# Altium footprint library WR-BHD.PcbLib: 220 footprints (part 1 of 14)
Each footprint in its own frame and in the unit in brackets; x right, y up, seen from the top. Pads: shape width x height; smd on the part's side, far side on the other; paste and mask are expansions set on the pad; w line width, h text height; cw(c..) or ccw(c..) is an arc to the next point about the centre after c.
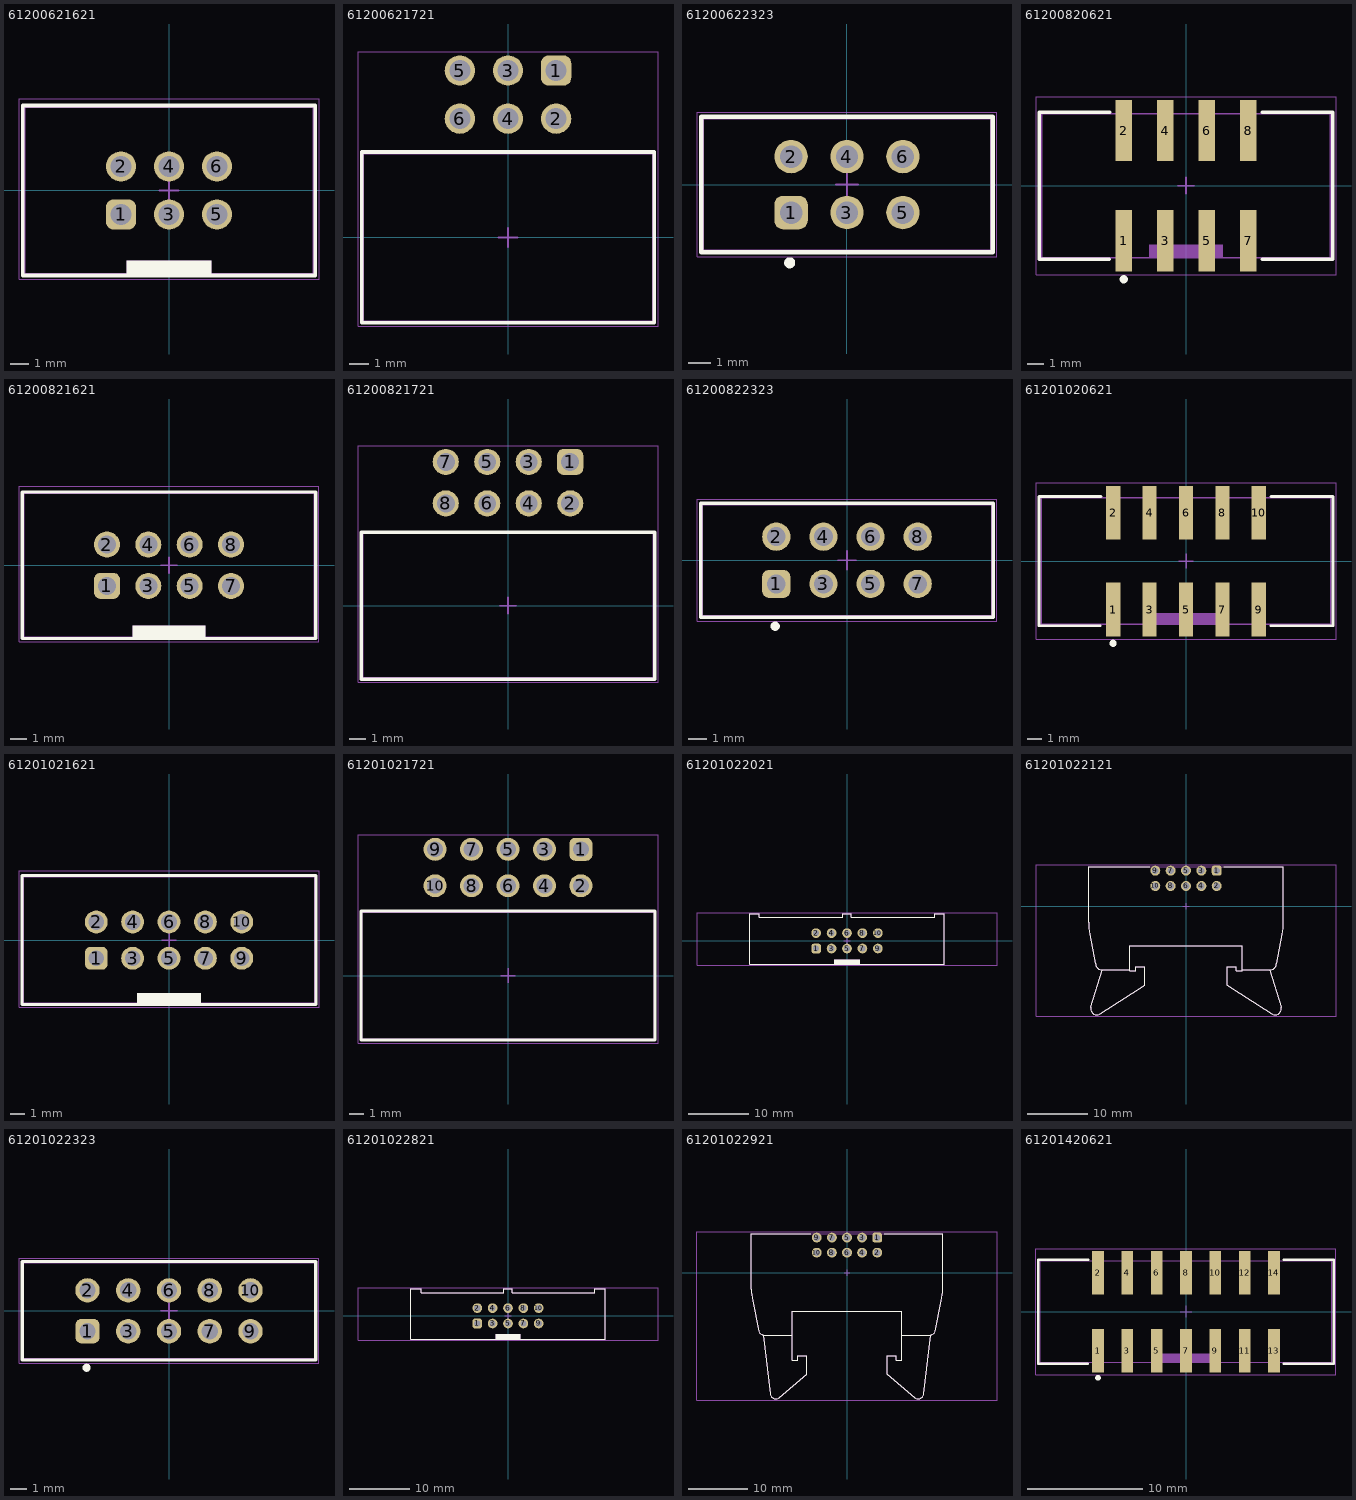
[diagram p0: the footprints below, top view; thin cyan lines are the x and y axes]

## 61200621621 [mm] "6 pins, straight, gold plating"
height 9.1
pads (6):
  rrect50% 1.6x1.6 hole 1.1: 1(-2.54,-1.27)
  round 1.6 hole 1.1: 2(-2.54,1.27) 3(0,-1.27) 4(0,1.27) 5(2.54,-1.27) 6(2.54,1.27)
Top Overlay:
  rectangle: -2.25,-4.5 2.25,-3.7
  lines w0.2: -7.74,-4.5 -7.74,4.5 7.74,4.5 7.74,-4.5 -7.74,-4.5
Top Assembly:
  rectangle: -2.25,-4.425 2.25,-3.7
  lines w0.1: -7.64,-4.425 7.64,-4.425 7.64,4.425 -7.64,4.425 -7.64,-4.425
Top Designator:
  text ".Designator" at -3.647,-0.357 h1
Top 3D Body:
  rectangle: -2.25,-4.425 2.25,-3.7
  lines w0.1: -7.64,-4.425 -7.64,4.425 7.64,4.425 7.64,-4.425 -7.64,-4.425
Top Courtyard:
  lines w0.05: -7.94,-4.7 -7.94,4.85 7.94,4.85 7.94,-4.7 -7.94,-4.7
Top Component Center:
  lines w0.1: -0.5,0 0.5,0 ; 0,-0.5 0,0.5
3D body "61200621621.stp": height 9.13, standoff -2.98, extent -7.64,-4.425 7.64,4.75

## 61200621721 [mm] "6 pins, right angled, gold plating"
height 9.1
pads (6):
  rrect50% 1.6x1.6 hole 1.1: 1(2.54,8.805)
  round 1.6 hole 1.1: 2(2.54,6.265) 3(0,8.805) 4(0,6.265) 5(-2.54,8.805) 6(-2.54,6.265)
Top Overlay:
  lines w0.2: -7.715,-4.5 7.715,-4.5 7.715,4.5 -7.715,4.5 -7.715,-4.5
Top Assembly:
  lines w0.1: -7.64,-4.425 7.64,-4.425 7.64,4.425 -7.64,4.425 -7.64,-4.425
Top Designator:
  text ".Designator" at -3.647,-0.357 h1
Top 3D Body:
  lines w0.1: -7.64,-4.425 -7.64,4.425 7.64,4.425 7.64,-4.425 -7.64,-4.425
Top Courtyard:
  lines w0.05: -7.915,-4.7 -7.915,9.805 7.915,9.805 7.915,-4.7 -7.915,-4.7
Top Component Center:
  lines w0.1: -0.5,0 0.5,0 ; 0,-0.5 0,0.5
3D body "61200621721.stp": height 9.23, standoff -2.88, extent -7.64,-4.425 7.64,9.125

## 61200622323 [mm] "6 pins, selective gold plating"
height 7.3
pads (6):
  rrect50% 1.52x1.52 hole 1.02: 1(-2.54,-1.27)
  round 1.52 hole 1.02: 2(-2.54,1.27) 3(0,-1.27) 4(0,1.27) 5(2.54,-1.27) 6(2.54,1.27)
Top Overlay:
  circle w0.25: c-2.6,-3.55 r0.125
  lines w0.2: -6.61,-3.075 6.61,-3.075 6.61,3.075 -6.61,3.075 -6.61,-3.075
Top Assembly:
  lines w0.1: -6.535,-3 -6.535,3 6.535,3 6.535,-3 -6.535,-3
Top Designator:
  text ".Designator" at -3.647,-0.357 h1
Top 3D Body:
  lines w0.1: -6.535,-3 6.535,-3 6.535,3 -6.535,3 -6.535,-3
Top Courtyard:
  lines w0.05: -6.81,-3.275 6.81,-3.275 6.81,3.275 -6.81,3.275 -6.81,-3.275
Top Component Center:
  lines w0.1: -0.5,0 0.5,0 ; 0,-0.5 0,0.5
3D body "61200622323.stp": height 9.33, standoff -3.27, extent -6.535,-3 6.535,3

## 61200820621 [mm] "8 pins, SMT, straight, gold plating"
height 9.2
pads (8):
  rect 1x3.75 smd: 1(-3.81,-3.375) 2(-3.81,3.375) 3(-1.27,-3.375) 4(-1.27,3.375) 5(1.27,-3.375) 6(1.27,3.375) 7(3.81,-3.375) 8(3.81,3.375)
Top Overlay:
  circle w0.25: c-3.81,-5.725 r0.125
  lines w0.2: -4.7,-4.5 -8.98,-4.5 -8.98,4.5 -4.65,4.5 ; 4.65,-4.5 8.98,-4.5 8.98,4.5 4.65,4.5
Top Assembly:
  rectangle: -2.25,-4.4 2.25,-3.6
  lines w0.1: -8.83,-4.4 -8.83,4.4 8.83,4.4 8.83,-4.4 -8.83,-4.4
Top Designator:
  text ".Designator" at -3.647,-0.357 h1
Top 3D Body:
  rectangle: -2.25,-4.4 2.25,-3.6
  lines w0.1: -8.83,-4.4 8.83,-4.4 8.83,4.4 -8.83,4.4 -8.83,-4.4
Top Courtyard:
  lines w0.05: -9.18,-5.45 9.18,-5.45 9.18,5.45 -9.18,5.45 -9.18,-5.45
Top Component Center:
  lines w0.1: -0.5,0 0.5,0 ; 0,-0.5 0,0.5
3D body "61200820621.stp": height 10.2, standoff 0.01, extent -8.89,-4.75 8.89,4.75

## 61200821621 [mm] "8 pins, straight, gold plating"
height 9.1
pads (8):
  rrect50% 1.6x1.6 hole 1.1: 1(-3.81,-1.27)
  round 1.6 hole 1.1: 2(-3.81,1.27) 3(-1.27,-1.27) 4(-1.27,1.27) 5(1.27,-1.27) 6(1.27,1.27) 7(3.81,-1.27) 8(3.81,1.27)
Top Overlay:
  rectangle: -2.25,-4.5 2.25,-3.7
  lines w0.2: -9.01,-4.5 9.01,-4.5 9.01,4.5 -9.01,4.5 -9.01,-4.5
Top Assembly:
  rectangle: -2.25,-4.425 2.25,-3.7
  lines w0.1: -8.91,-4.425 -8.91,4.425 8.91,4.425 8.91,-4.425 -8.91,-4.425
Top Designator:
  text ".Designator" at -3.647,-0.357 h1
Top 3D Body:
  rectangle: -2.25,-4.425 2.25,-3.7
  lines w0.1: -8.91,-4.425 8.91,-4.425 8.91,4.425 -8.91,4.425 -8.91,-4.425
Top Courtyard:
  lines w0.05: -9.21,-4.7 9.21,-4.7 9.21,4.85 -9.21,4.85 -9.21,-4.7
Top Component Center:
  lines w0.1: -0.5,0 0.5,0 ; 0,-0.5 0,0.5
3D body "61200821621.stp": height 9.13, standoff -2.98, extent -8.91,-4.425 8.91,4.75

## 61200821721 [mm] "8 pins, right angled, gold plating"
height 9.1
pads (8):
  rrect50% 1.6x1.6 hole 1.1: 1(3.81,8.805)
  round 1.6 hole 1.1: 2(3.81,6.265) 3(1.27,8.805) 4(1.27,6.265) 5(-1.27,8.805) 6(-1.27,6.265) 7(-3.81,8.805) 8(-3.81,6.265)
Top Overlay:
  lines w0.2: -8.985,-4.5 -8.985,4.5 8.985,4.5 8.985,-4.5 -8.985,-4.5
Top Assembly:
  lines w0.1: -8.91,-4.425 -8.91,4.425 8.91,4.425 8.91,-4.425 -8.91,-4.425
Top Designator:
  text ".Designator" at -3.647,-0.357 h1
Top 3D Body:
  lines w0.1: -8.91,-4.425 8.91,-4.425 8.91,4.425 -8.91,4.425 -8.91,-4.425
Top Courtyard:
  lines w0.05: -9.185,-4.7 9.185,-4.7 9.185,9.805 -9.185,9.805 -9.185,-4.7
Top Component Center:
  lines w0.1: -0.5,0 0.5,0 ; 0,-0.5 0,0.5
3D body "61200821721.stp": height 9.23, standoff -2.88, extent -8.91,-4.425 8.91,9.125

## 61200822323 [mm] "8 pins, selective gold plating"
height 7.3
pads (8):
  rrect50% 1.52x1.52 hole 1.02: 1(-3.81,-1.27)
  round 1.52 hole 1.02: 2(-3.81,1.27) 3(-1.27,-1.27) 4(-1.27,1.27) 5(1.27,-1.27) 6(1.27,1.27) 7(3.81,-1.27) 8(3.81,1.27)
Top Overlay:
  circle w0.25: c-3.87,-3.55 r0.125
  lines w0.2: -7.88,-3.075 -7.88,3.075 7.88,3.075 7.88,-3.075 -7.88,-3.075
Top Assembly:
  lines w0.1: -7.805,-3 7.805,-3 7.805,3 -7.805,3 -7.805,-3
Top Designator:
  text ".Designator" at -3.647,-0.357 h1
Top 3D Body:
  lines w0.1: -7.805,-3 -7.805,3 7.805,3 7.805,-3 -7.805,-3
Top Courtyard:
  lines w0.05: -8.08,-3.275 -8.08,3.275 8.08,3.275 8.08,-3.275 -8.08,-3.275
Top Component Center:
  lines w0.1: -0.5,0 0.5,0 ; 0,-0.5 0,0.5
3D body "61200822323.stp": height 9.33, standoff -3.27, extent -7.805,-3 7.805,3

## 61201020621 [mm] "10 pins, SMT, straight, gold plating"
height 9.2
pads (10):
  rect 1x3.75 smd: 1(-5.08,-3.375) 2(-5.08,3.375) 3(-2.54,-3.375) 4(-2.54,3.375) 5(0,-3.375) 6(0,3.375) 7(2.54,-3.375) 8(2.54,3.375) 9(5.08,-3.375) 10(5.08,3.375)
Top Overlay:
  circle w0.25: c-5.08,-5.725 r0.125
  lines w0.2: -5.97,-4.5 -10.25,-4.5 -10.25,4.5 -5.92,4.5 ; 5.92,-4.5 10.25,-4.5 10.25,4.5 5.92,4.5
Top Assembly:
  rectangle: -2.25,-4.4 2.25,-3.6
  lines w0.1: -10.1,-4.4 10.1,-4.4 10.1,4.4 -10.1,4.4 -10.1,-4.4
Top Designator:
  text ".Designator" at -3.647,-0.357 h1
Top 3D Body:
  rectangle: -2.25,-4.4 2.25,-3.6
  lines w0.1: -10.1,-4.4 -10.1,4.4 10.1,4.4 10.1,-4.4 -10.1,-4.4
Top Courtyard:
  lines w0.05: -10.45,-5.45 -10.45,5.45 10.45,5.45 10.45,-5.45 -10.45,-5.45
Top Component Center:
  lines w0.1: -0.5,0 0.5,0 ; 0,-0.5 0,0.5
3D body "61201020621.stp": height 10.2, standoff 0.01, extent -10.16,-4.75 10.16,4.75

## 61201021621 [mm] "10 pins, straight, gold plating"
height 9.1
pads (10):
  rrect50% 1.6x1.6 hole 1.1: 1(-5.08,-1.27)
  round 1.6 hole 1.1: 2(-5.08,1.27) 3(-2.54,-1.27) 4(-2.54,1.27) 5(0,-1.27) 6(0,1.27) 7(2.54,-1.27) 8(2.54,1.27) 9(5.08,-1.27) 10(5.08,1.27)
Top Overlay:
  rectangle: -2.25,-4.5 2.25,-3.7
  lines w0.2: -10.28,-4.5 -10.28,4.5 10.28,4.5 10.28,-4.5 -10.28,-4.5
Top Assembly:
  rectangle: -2.25,-4.425 2.25,-3.7
  lines w0.1: -10.18,-4.425 10.18,-4.425 10.18,4.425 -10.18,4.425 -10.18,-4.425
Top Designator:
  text ".Designator" at -3.647,-0.357 h1
Top 3D Body:
  rectangle: -2.25,-4.425 2.25,-3.7
  lines w0.1: -10.18,-4.425 -10.18,4.425 10.18,4.425 10.18,-4.425 -10.18,-4.425
Top Courtyard:
  lines w0.05: -10.48,-4.7 -10.48,4.85 10.48,4.85 10.48,-4.7 -10.48,-4.7
Top Component Center:
  lines w0.1: -0.5,0 0.5,0 ; 0,-0.5 0,0.5
3D body "61201021621.stp": height 9.13, standoff -2.98, extent -10.18,-4.425 10.18,4.75

## 61201021721 [mm] "10 pins, right angled, gold plating"
height 9.1
pads (10):
  rrect50% 1.6x1.6 hole 1.1: 1(5.08,8.805)
  round 1.6 hole 1.1: 2(5.08,6.265) 3(2.54,8.805) 4(2.54,6.265) 5(0,8.805) 6(0,6.265) 7(-2.54,8.805) 8(-2.54,6.265) 9(-5.08,8.805) 10(-5.08,6.265)
Top Overlay:
  lines w0.2: -10.255,-4.5 10.255,-4.5 10.255,4.5 -10.255,4.5 -10.255,-4.5
Top Assembly:
  lines w0.1: -10.18,-4.425 10.18,-4.425 10.18,4.425 -10.18,4.425 -10.18,-4.425
Top Designator:
  text ".Designator" at -3.647,-0.357 h1
Top 3D Body:
  lines w0.1: -10.18,-4.425 -10.18,4.425 10.18,4.425 10.18,-4.425 -10.18,-4.425
Top Courtyard:
  lines w0.05: -10.455,-4.7 -10.455,9.805 10.455,9.805 10.455,-4.7 -10.455,-4.7
Top Component Center:
  lines w0.1: -0.5,0 0.5,0 ; 0,-0.5 0,0.5
3D body "61201021721.stp": height 9.23, standoff -2.88, extent -10.18,-4.425 10.18,9.125

## 61201022021 [mm] "10 pins, straight, short lever, gold plating"
height 24.5
pads (10):
  rrect50% 1.6x1.6 hole 1.02: 1(-5.08,-1.27)
  round 1.6 hole 1.02: 2(-5.08,1.27) 3(-2.54,-1.27) 4(-2.54,1.27) 5(0,-1.27) 6(0,1.27) 7(2.54,-1.27) 8(2.54,1.27) 9(5.08,-1.27) 10(5.08,1.27)
Top Overlay:
  rectangle: -2.1,-3.85 2.1,-3.05
  lines w0.2: -0.7,4.45 -0.7,3.85 -14.45,3.85 -14.45,4.45 -16,4.45 -16,-3.85 16,-3.85 16,4.45 14.45,4.45 14.45,3.85 0.7,3.85 0.7,4.45 -0.7,4.45 ; -0.7,4.45 -0.7,4.45
Top Assembly:
  rectangle: -2.1,-3.85 2.1,-3.05
  lines w0.1: -0.7,4.45 0.7,4.45 0.7,3.85 14.45,3.85 14.45,4.45 16,4.45 16,-3.85 -16,-3.85 -16,4.45 -14.45,4.45 -14.45,3.85 -0.7,3.85 -0.7,4.45 ; -0.7,4.45 -0.7,4.45
Top Designator:
  text ".Designator" at -3.647,-0.357 h1
Top 3D Body:
  rectangle: -2.1,-3.85 2.1,-3.05
  lines w0.1: -0.7,4.45 -0.7,3.85 -14.45,3.85 -14.45,4.45 -16,4.45 -16,-3.85 16,-3.85 16,4.45 14.45,4.45 14.45,3.85 0.7,3.85 0.7,4.45 -0.7,4.45 ; -0.7,4.45 -0.7,4.45
Top Courtyard:
  lines w0.05: -24.7,-4.05 -24.7,4.65 24.7,4.65 24.7,-4.05 -24.7,-4.05
Top Component Center:
  lines w0.1: -0.5,0 0.5,0 ; 0,-0.5 0,0.5
3D body "61201022021.stp": height 24.55, standoff -3.35, extent -16.1,-3.85 16.1,4.45

## 61201022121 [mm] "10 pins, right angeled, short lever, gold plating"
height 8.3
pads (10):
  rrect50% 1.65x1.65 hole 1.1: 1(5.08,5.88)
  round 1.65 hole 1.1: 2(5.08,3.34) 3(2.54,5.88) 4(2.54,3.34) 5(0,5.88) 6(0,3.34) 7(-2.54,5.88) 8(-2.54,3.34) 9(-5.08,5.88) 10(-5.08,3.34)
Top Overlay:
  lines w0.2: -14.964,-9.501 -15.906,-4.611 cw(c-6.1,-2.65) -16.1,-2.65 -16.1,6.5 -6,6.5 ; -14.96,-9.5 ccw(c-13.96,-9.5) -13.96,-10.5 ; -14.055,-10.5 -9.3,-10.5 ; -13.874,-10.601 -15.707,-16.691 ccw(c-14.75,-16.98) -14.2,-17.815 -6.8,-13.08 -6.8,-9.98 -8.3,-9.98 -8.3,-10.69 -9.3,-10.69 -9.3,-6.5 9.3,-6.5 9.3,-10.69 8.3,-10.69 8.3,-9.98 6.8,-9.98 6.8,-13.08 14.2,-17.816 ccw(c14.75,-16.98) 15.707,-16.691 13.874,-10.601 ; 6.25,6.5 16.1,6.5 16.1,-2.65 cw(c6.1,-2.65) 15.906,-4.611 14.964,-9.501 ; 9.3,-10.5 14.055,-10.5 ; 13.96,-10.5 ccw(c13.96,-9.5) 14.96,-9.5
Top Assembly:
  lines w0.1: -14.964,-9.501 -15.906,-4.611 cw(c-6.1,-2.65) -16.1,-2.65 -16.1,6.5 16.1,6.5 16.1,-2.65 cw(c6.1,-2.65) 15.906,-4.611 14.964,-9.501 ; -14.96,-9.5 ccw(c-13.96,-9.5) -13.96,-10.5 ; -14.055,-10.5 -9.3,-10.5 ; -13.874,-10.601 -15.707,-16.691 ccw(c-14.75,-16.98) -14.2,-17.815 -6.8,-13.08 -6.8,-9.98 -8.3,-9.98 -8.3,-10.69 -9.3,-10.69 -9.3,-6.5 9.3,-6.5 9.3,-10.69 8.3,-10.69 8.3,-9.98 6.8,-9.98 6.8,-13.08 14.2,-17.816 ccw(c14.75,-16.98) 15.707,-16.691 13.874,-10.601 ; 9.3,-10.5 14.055,-10.5 ; 13.96,-10.5 ccw(c13.96,-9.5) 14.96,-9.5
Top Designator:
  text ".Designator" at -3.647,-0.357 h1
Top 3D Body:
  lines w0.1: -14.964,-9.501 -15.906,-4.611 cw(c-6.1,-2.65) -16.1,-2.65 -16.1,6.5 16.1,6.5 16.1,-2.65 cw(c6.1,-2.65) 15.906,-4.611 14.964,-9.501 ; -14.96,-9.5 ccw(c-13.96,-9.5) -13.96,-10.5 ; -14.055,-10.5 -9.3,-10.5 ; -13.874,-10.601 -15.707,-16.691 ccw(c-14.75,-16.98) -14.2,-17.815 -6.8,-13.08 -6.8,-9.98 -8.3,-9.98 -8.3,-10.69 -9.3,-10.69 -9.3,-6.5 9.3,-6.5 9.3,-10.69 8.3,-10.69 8.3,-9.98 6.8,-9.98 6.8,-13.08 14.2,-17.816 ccw(c14.75,-16.98) 15.707,-16.691 13.874,-10.601 ; 9.3,-10.5 14.055,-10.5 ; 13.96,-10.5 ccw(c13.96,-9.5) 14.96,-9.5
Top Courtyard:
  lines w0.05: -24.8,-18.2 -24.8,6.88 24.8,6.88 24.8,-18.2 -24.8,-18.2
Top Component Center:
  lines w0.1: -0.5,0 0.5,0 ; 0,-0.5 0,0.5
3D body "61201022121.stp": height 8.35, standoff -3.35, extent -16.1,-18 16.1,6.5

## 61201022323 [mm] "10 pins, selective gold plating"
height 7.3
pads (10):
  rrect50% 1.52x1.52 hole 1.02: 1(-5.08,-1.27)
  round 1.52 hole 1.02: 2(-5.08,1.27) 3(-2.54,-1.27) 4(-2.54,1.27) 5(0,-1.27) 6(0,1.27) 7(2.54,-1.27) 8(2.54,1.27) 9(5.08,-1.27) 10(5.08,1.27)
Top Overlay:
  circle w0.25: c-5.14,-3.55 r0.125
  lines w0.2: -9.15,-3.075 9.15,-3.075 9.15,3.075 -9.15,3.075 -9.15,-3.075
Top Assembly:
  lines w0.1: -9.075,-3 -9.075,3 9.075,3 9.075,-3 -9.075,-3
Top Designator:
  text ".Designator" at -3.647,-0.357 h1
Top 3D Body:
  lines w0.1: -9.075,-3 9.075,-3 9.075,3 -9.075,3 -9.075,-3
Top Courtyard:
  lines w0.05: -9.35,-3.275 9.35,-3.275 9.35,3.275 -9.35,3.275 -9.35,-3.275
Top Component Center:
  lines w0.1: -0.5,0 0.5,0 ; 0,-0.5 0,0.5
3D body "61201022323.stp": height 9.33, standoff -3.27, extent -9.075,-3 9.075,3

## 61201022821 [mm] "10 pins, straight, long lever, gold plating"
height 28
pads (10):
  rrect50% 1.6x1.6 hole 1.02: 1(-5.08,-1.27)
  round 1.6 hole 1.02: 2(-5.08,1.27) 3(-2.54,-1.27) 4(-2.54,1.27) 5(0,-1.27) 6(0,1.27) 7(2.54,-1.27) 8(2.54,1.27) 9(5.08,-1.27) 10(5.08,1.27)
Top Overlay:
  rectangle: -2.1,-3.85 2.1,-3.04
  lines w0.2: -16.1,-3.85 16.1,-3.85 16.1,4.45 14.37,4.45 14.37,3.85 0.7,3.85 0.7,4.45 -0.7,4.45 -0.7,3.85 -14.37,3.85 -14.37,4.45 -16.1,4.45 -16.1,-3.85
Top Assembly:
  rectangle: -2.1,-3.85 2.1,-3.04
  lines w0.1: -16.1,-3.85 -16.1,4.45 -14.37,4.45 -14.37,3.85 -0.7,3.85 -0.7,4.45 0.7,4.45 0.7,3.85 14.37,3.85 14.37,4.45 16.1,4.45 16.1,-3.85 -16.1,-3.85
Top Designator:
  text ".Designator" at -3.647,-0.357 h1
Top 3D Body:
  rectangle: -2.1,-3.85 2.1,-3.04
  lines w0.1: -16.1,-3.85 16.1,-3.85 16.1,4.45 14.37,4.45 14.37,3.85 0.7,3.85 0.7,4.45 -0.7,4.45 -0.7,3.85 -14.37,3.85 -14.37,4.45 -16.1,4.45 -16.1,-3.85
Top Courtyard:
  lines w0.05: -24.8,-4.05 -24.8,4.65 24.8,4.65 24.8,-4.05 -24.8,-4.05
Top Component Center:
  lines w0.1: -0.5,0 0.5,0 ; 0,-0.5 0,0.5
3D body "61201022821 (rev1).stp": height 27.84, standoff -3.35, extent -16.1,-3.86 16.1,4.45

## 61201022921 [mm] "10 pins, right angeled, long lever, gold plating"
height 10.8
pads (10):
  rrect50% 1.65x1.65 hole 1.1: 1(5.08,5.88)
  round 1.65 hole 1.1: 2(5.08,3.34) 3(2.54,5.88) 4(2.54,3.34) 5(0,5.88) 6(0,3.34) 7(-2.54,5.88) 8(-2.54,3.34) 9(-5.08,5.88) 10(-5.08,3.34)
Top Overlay:
  lines w0.2: -16.1,-2.81 -16.1,6.5 -6.05,6.5 ; -16.096,-2.81 ccw(c-6.1,-2.51) -15.854,-4.714 -14.809,-9.884 ; -14.804,-9.883 ccw(c-13.88,-9.5) -13.88,-10.5 -9.2,-10.5 ; -14.064,-10.5 -12.918,-20.372 ccw(c-11.93,-20.22) -11.272,-20.973 -6.801,-17.109 ; -6.8,-17.11 -6.8,-14.01 -8.3,-14.01 -8.3,-14.72 -9.2,-14.72 -9.2,-6.5 9.2,-6.5 9.2,-14.72 8.3,-14.72 8.3,-14.01 6.8,-14.01 6.8,-17.11 ; 6.25,6.5 16.1,6.5 16.1,-2.81 ; 6.801,-17.109 11.272,-20.973 ccw(c11.93,-20.22) 12.918,-20.372 14.064,-10.5 ; 9.2,-10.5 13.88,-10.5 ccw(c13.88,-9.5) 14.804,-9.883 ; 14.809,-9.884 15.854,-4.714 ccw(c6.1,-2.51) 16.096,-2.81
Top Assembly:
  lines w0.1: -16.1,-2.81 -16.1,6.5 16.1,6.5 16.1,-2.81 ; -16.096,-2.81 ccw(c-6.1,-2.51) -15.854,-4.714 -14.809,-9.884 ; -14.804,-9.883 ccw(c-13.88,-9.5) -13.88,-10.5 -9.2,-10.5 ; -14.064,-10.5 -12.918,-20.372 ccw(c-11.93,-20.22) -11.272,-20.973 -6.801,-17.109 ; -6.8,-17.11 -6.8,-14.01 -8.3,-14.01 -8.3,-14.72 -9.2,-14.72 -9.2,-6.5 9.2,-6.5 9.2,-14.72 8.3,-14.72 8.3,-14.01 6.8,-14.01 6.8,-17.11 ; 6.801,-17.109 11.272,-20.973 ccw(c11.93,-20.22) 12.918,-20.372 14.064,-10.5 ; 9.2,-10.5 13.88,-10.5 ccw(c13.88,-9.5) 14.804,-9.883 ; 14.809,-9.884 15.854,-4.714 ccw(c6.1,-2.51) 16.096,-2.81
Top Designator:
  text ".Designator" at -3.647,-0.357 h1
Top 3D Body:
  lines w0.1: -16.1,-2.81 -16.1,6.5 16.1,6.5 16.1,-2.81 ; -16.096,-2.81 ccw(c-6.1,-2.51) -15.854,-4.714 -14.809,-9.884 ; -14.804,-9.883 ccw(c-13.88,-9.5) -13.88,-10.5 -9.2,-10.5 ; -14.064,-10.5 -12.918,-20.372 ccw(c-11.93,-20.22) -11.272,-20.973 -6.801,-17.109 ; -6.8,-17.11 -6.8,-14.01 -8.3,-14.01 -8.3,-14.72 -9.2,-14.72 -9.2,-6.5 9.2,-6.5 9.2,-14.72 8.3,-14.72 8.3,-14.01 6.8,-14.01 6.8,-17.11 ; 6.801,-17.109 11.272,-20.973 ccw(c11.93,-20.22) 12.918,-20.372 14.064,-10.5 ; 9.2,-10.5 13.88,-10.5 ccw(c13.88,-9.5) 14.804,-9.883 ; 14.809,-9.884 15.854,-4.714 ccw(c6.1,-2.51) 16.096,-2.81
Top Courtyard:
  lines w0.05: -25.2,-21.41 -25.2,6.88 25.2,6.88 25.2,-21.41 -25.2,-21.41
Top Component Center:
  lines w0.1: -0.5,0 0.5,0 ; 0,-0.5 0,0.5
3D body "61201022921 (rev1).stp": height 8.35, standoff -2.35, extent -16.1,-21.211 16.1,6.51

## 61201420621 [mm] "14 pins, SMT, straight, gold plating"
height 9.2
pads (14):
  rect 1x3.75 smd: 1(-7.62,-3.375) 2(-7.62,3.375) 3(-5.08,-3.375) 4(-5.08,3.375) 5(-2.54,-3.375) 6(-2.54,3.375) 7(0,-3.375) 8(0,3.375) 9(2.54,-3.375) 10(2.54,3.375) 11(5.08,-3.375) 12(5.08,3.375) 13(7.62,-3.375) 14(7.62,3.375)
Top Overlay:
  circle w0.25: c-7.62,-5.725 r0.125
  lines w0.2: -8.51,-4.5 -12.79,-4.5 -12.79,4.5 -8.46,4.5 ; 8.46,-4.5 12.79,-4.5 12.79,4.5 8.46,4.5
Top Assembly:
  rectangle: -2.25,-4.4 2.25,-3.6
  lines w0.1: -12.64,-4.4 12.64,-4.4 12.64,4.4 -12.64,4.4 -12.64,-4.4
Top Designator:
  text ".Designator" at -3.647,-0.357 h1
Top 3D Body:
  rectangle: -2.25,-4.4 2.25,-3.6
  lines w0.1: -12.64,-4.4 -12.64,4.4 12.64,4.4 12.64,-4.4 -12.64,-4.4
Top Courtyard:
  lines w0.05: -12.99,-5.45 -12.99,5.45 12.99,5.45 12.99,-5.45 -12.99,-5.45
Top Component Center:
  lines w0.1: -0.5,0 0.5,0 ; 0,-0.5 0,0.5
3D body "61201420621.stp": height 10.2, standoff 0.01, extent -12.7,-4.75 12.7,4.75